# Altium schematic symbol library DS3234S.SchLib: 1 symbol
Pins are listed as number, name and electrical type; pins without a type are passive.

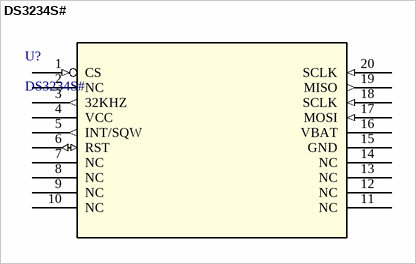
[diagram p0: symbol DS3234S#]

## DS3234S#
designator U?
No Description Available; Vendor: Maxim Integrated Products; Built_By: EMA_UL_Team; Manufacturer_Part_Number: DS3234S#; Copyright: Copyright (C) 2018 Accelerated Designs. All rights reserved; RefDes: RefDes; Type: DEV; Value: Value
footprint 21-0042B_20
pins: 1 CS (in), 2 NC, 3 32KHZ (out), 4 VCC (power), 5 INT/SQW (out), 6 RST (io), 7 NC, 8 NC, 9 NC, 10 NC, 11 NC, 12 NC, 13 NC, 14 NC, 15 GND (power), 16 VBAT (power), 17 MOSI (in), 18 SCLK (in), 19 MISO (out), 20 SCLK (in)